# Altium schematic symbol library XT30PB-M.SchLib: 1 symbol
Pins are listed as number, name and electrical type; pins without a type are passive.

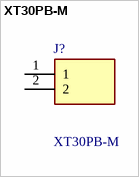
[diagram p0: symbol XT30PB-M]

## XT30PB-M
designator J?
Brass Gold Plated Connector 0.65m , 500VDC , 15A , -20 to 120; Manufacturer_Name: Amass; Geometry.Height: 10.7mm; Manufacturer_Part_Number: XT30PB-M; Mouser Part Number: *; Mouser Price/Stock: *; Arrow Part Number: *; Arrow Price/Stock: *; Datasheet Link: https://g.componentsearchengine.com/ga/Vtm2s6UR3EprZ4UN
footprint XT30PBM
pins: 1, 2